# Altium footprint library footprints.PcbLib: 65 footprints (part 2 of 5)
Each footprint in its own frame and in the unit in brackets; x right, y up, seen from the top. Pads: shape width x height; smd on the part's side, far side on the other; paste and mask are expansions set on the pad; w line width, h text height; cw(c..) or ccw(c..) is an arc to the next point about the centre after c.
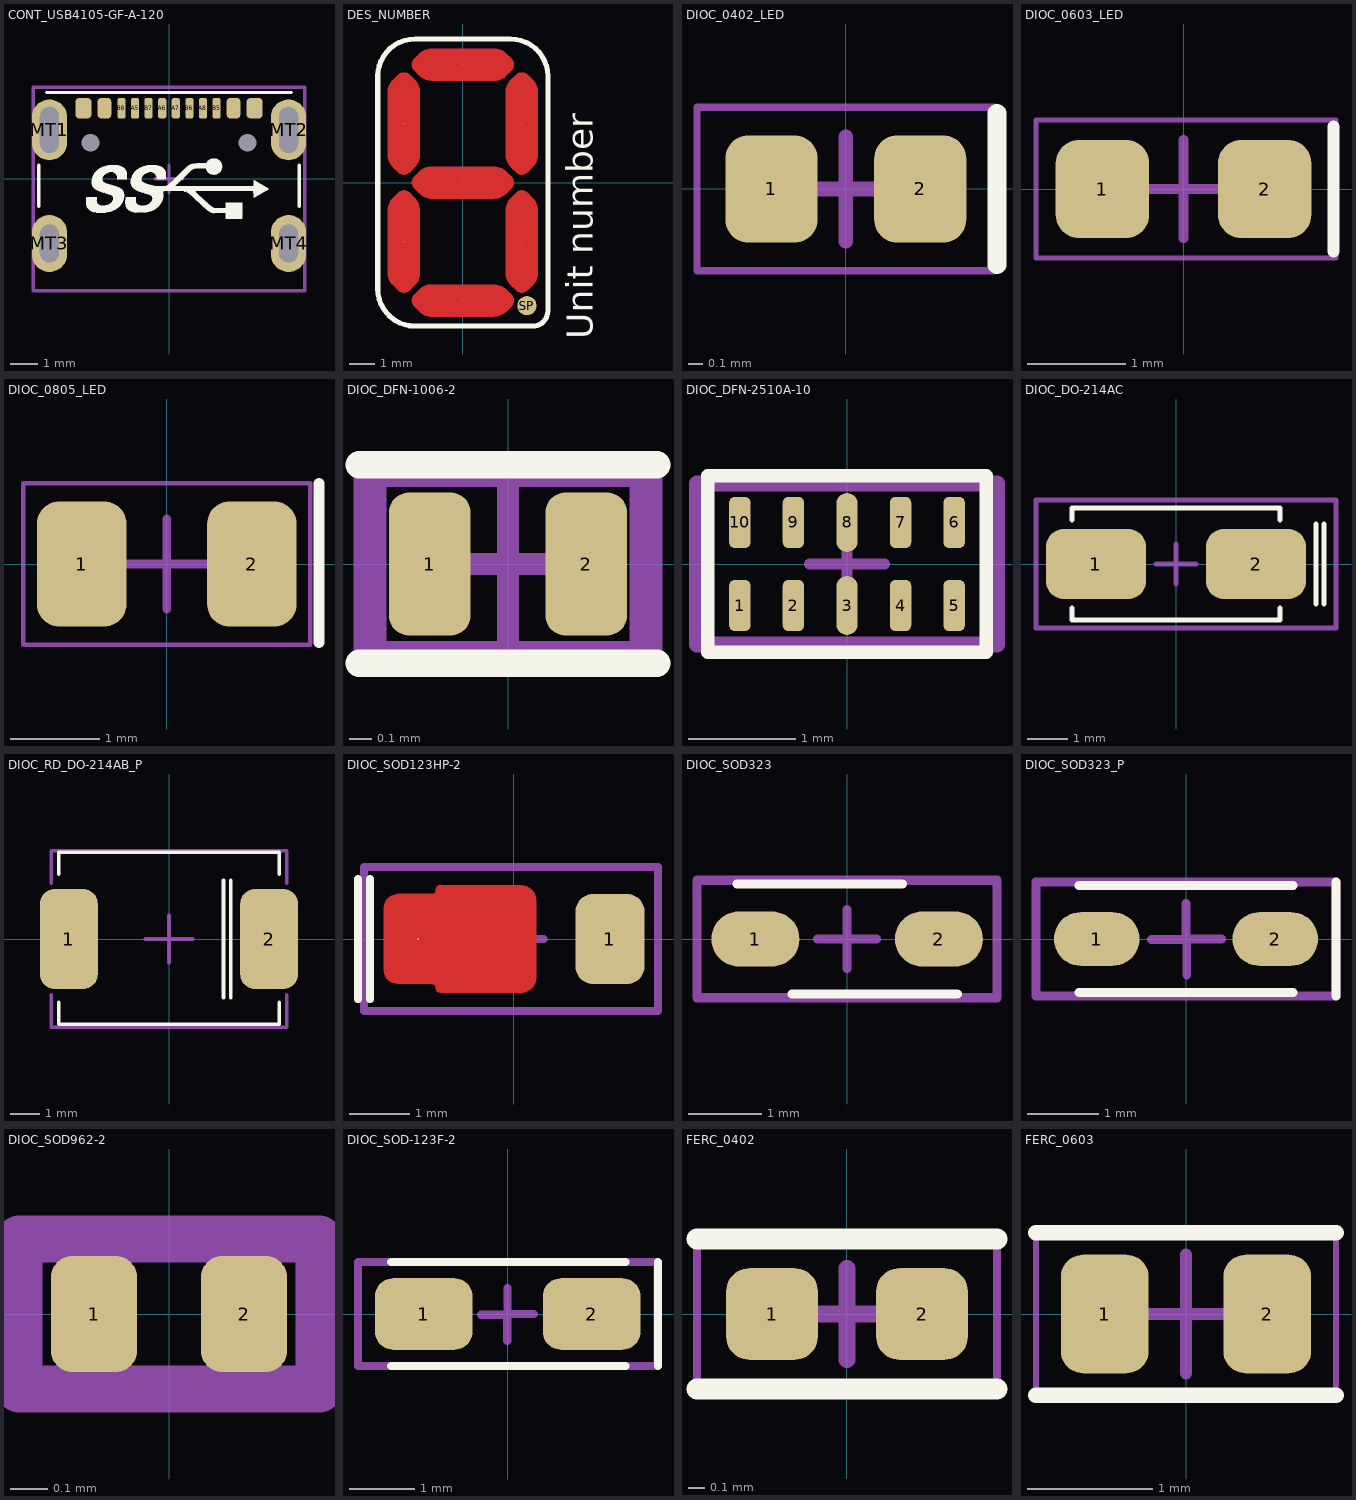
[diagram p1: the footprints below, top view; thin cyan lines are the x and y axes]

## CONT_USB4105-GF-A-120 [mm]
pads (18):
  rrect50% 0.6x0.75 smd mask+0.075: A1/B12(-3.15,2.6) B1/A12(3.15,2.6)
  rrect50% 0.5x0.75 smd mask+0.075: A4/B9(-2.375,2.6) B4/A9(2.375,2.6)
  rrect50% 0.3x0.75 smd mask+0.075: A5(-1.25,2.6) A6(-0.25,2.6) A7(0.25,2.6) A8(1.25,2.6) B5(1.75,2.6) B6(0.75,2.6) B7(-0.75,2.6) B8(-1.75,2.6)
  rrect50% 0.3x0.3 hole 0.65 unplated: MH(-2.89,1.325) MH(2.89,1.325)
  oval 1.3x2.24 / inner oval 1.3x2.24 / far side oval 1.5x2.5 hole 0.7 slot 1.7 at 90 deg: MT1(-4.4,1.803) MT2(4.4,1.803)
  oval 1.3x2.1 / inner oval 1.3x2.1 / far side oval 1.5x2.35 hole 0.7 slot 1.4 at 90 deg: MT3(-4.4,-2.377) MT4(4.4,-2.377)
Top Overlay:
  drawing of 5 lines, arcs and shapes, not listed
Mechanical 15:
  lines w0.125: -0.5,0 0,0 ; 0,-0.5 0,0 ; 0,0.5 0,0 ; 0.5,0 0,0 ; -5,-4.122 5,-4.122 5,3.378 -5,3.378 -5,-4.122
3D body "USB4105-GF-A-120.stp": height 3.26, standoff -1.2, extent -4.47,-4.922 4.47,2.778

## DES_NUMBER [mm]
pads (8):
  round 0.75 smd paste-2539.97 mask+0.05: SP(2.5,-4.8)
  round 0.025 smd paste-2539.97 mask+0.05: SP1(-2.3,2.3) SP2(0,4.6) SP3(2.3,2.3) SP4(2.3,-2.3) SP5(0,-4.6) SP6(-2.3,-2.3) SP7(0,0)
Top Layer:
  region: 1.888,-0.587 2.075,-0.4 2.097,-0.378 2.149,-0.343 2.207,-0.319 2.269,-0.307 2.331,-0.307 2.393,-0.319 2.451,-0.343 2.503,-0.378 2.525,-0.4 2.712,-0.587 2.737,-0.612 2.782,-0.667 2.822,-0.727 2.856,-0.79 2.883,-0.856 2.904,-0.925 2.918,-0.995 2.925,-1.066 2.925,-1.102 2.925,-3.54 2.925,-3.571 2.919,-3.632 2.907,-3.693 2.889,-3.752 2.865,-3.809 2.836,-3.863 2.802,-3.915 2.763,-3.962 2.741,-3.984 2.525,-4.2 2.503,-4.222 2.451,-4.257 2.393,-4.281 2.331,-4.293 2.269,-4.293 2.207,-4.281 2.149,-4.257 2.097,-4.222 2.075,-4.2 1.859,-3.984 1.837,-3.962 1.798,-3.915 1.764,-3.863 1.735,-3.809 1.711,-3.752 1.693,-3.693 1.681,-3.632 1.675,-3.571 1.675,-3.54 1.675,-1.102 1.675,-1.066 1.682,-0.995 1.696,-0.925 1.717,-0.856 1.744,-0.79 1.778,-0.727 1.818,-0.667 1.863,-0.612
  region: -1.888,-0.587 -2.075,-0.4 -2.097,-0.378 -2.149,-0.343 -2.207,-0.319 -2.269,-0.307 -2.331,-0.307 -2.393,-0.319 -2.451,-0.343 -2.503,-0.378 -2.525,-0.4 -2.712,-0.587 -2.737,-0.612 -2.782,-0.667 -2.822,-0.727 -2.856,-0.79 -2.883,-0.856 -2.904,-0.925 -2.918,-0.995 -2.925,-1.066 -2.925,-1.102 -2.925,-3.54 -2.925,-3.571 -2.919,-3.632 -2.907,-3.693 -2.889,-3.752 -2.865,-3.809 -2.836,-3.863 -2.802,-3.915 -2.763,-3.962 -2.741,-3.984 -2.525,-4.2 -2.503,-4.222 -2.451,-4.257 -2.393,-4.281 -2.331,-4.293 -2.269,-4.293 -2.207,-4.281 -2.149,-4.257 -2.097,-4.222 -2.075,-4.2 -1.859,-3.984 -1.837,-3.962 -1.798,-3.915 -1.764,-3.863 -1.735,-3.809 -1.711,-3.752 -1.693,-3.693 -1.681,-3.632 -1.675,-3.571 -1.675,-3.54 -1.675,-1.102 -1.675,-1.066 -1.682,-0.995 -1.696,-0.925 -1.717,-0.856 -1.744,-0.79 -1.778,-0.727 -1.818,-0.667 -1.863,-0.612
  region: 1.713,-0.412 1.9,-0.225 1.922,-0.203 1.957,-0.151 1.981,-0.093 1.993,-0.031 1.993,0.031 1.981,0.093 1.957,0.151 1.922,0.203 1.9,0.225 1.713,0.412 1.688,0.437 1.633,0.482 1.573,0.522 1.51,0.556 1.444,0.583 1.375,0.604 1.305,0.618 1.234,0.625 1.198,0.625 -1.24,0.625 -1.271,0.625 -1.332,0.619 -1.393,0.607 -1.452,0.589 -1.509,0.565 -1.563,0.536 -1.615,0.502 -1.662,0.463 -1.684,0.441 -1.9,0.225 -1.922,0.203 -1.957,0.151 -1.981,0.093 -1.993,0.031 -1.993,-0.031 -1.981,-0.093 -1.957,-0.151 -1.922,-0.203 -1.9,-0.225 -1.684,-0.441 -1.662,-0.463 -1.615,-0.502 -1.563,-0.536 -1.509,-0.565 -1.452,-0.589 -1.393,-0.607 -1.332,-0.619 -1.271,-0.625 -1.24,-0.625 1.198,-0.625 1.234,-0.625 1.305,-0.618 1.375,-0.604 1.444,-0.583 1.51,-0.556 1.573,-0.522 1.633,-0.482 1.688,-0.437
  region: -1.888,0.587 -2.075,0.4 -2.097,0.378 -2.149,0.343 -2.207,0.319 -2.269,0.307 -2.331,0.307 -2.393,0.319 -2.451,0.343 -2.503,0.378 -2.525,0.4 -2.712,0.587 -2.737,0.612 -2.782,0.667 -2.822,0.727 -2.856,0.79 -2.883,0.856 -2.904,0.925 -2.918,0.995 -2.925,1.066 -2.925,1.102 -2.925,3.54 -2.925,3.571 -2.919,3.632 -2.907,3.693 -2.889,3.752 -2.865,3.809 -2.836,3.863 -2.802,3.915 -2.763,3.962 -2.741,3.984 -2.525,4.2 -2.503,4.222 -2.451,4.257 -2.393,4.281 -2.331,4.293 -2.269,4.293 -2.207,4.281 -2.149,4.257 -2.097,4.222 -2.075,4.2 -1.859,3.984 -1.837,3.962 -1.798,3.915 -1.764,3.863 -1.735,3.809 -1.711,3.752 -1.693,3.693 -1.681,3.632 -1.675,3.571 -1.675,3.54 -1.675,1.102 -1.675,1.066 -1.682,0.995 -1.696,0.925 -1.717,0.856 -1.744,0.79 -1.778,0.727 -1.818,0.667 -1.863,0.612
  region: 1.888,0.587 2.075,0.4 2.097,0.378 2.149,0.343 2.207,0.319 2.269,0.307 2.331,0.307 2.393,0.319 2.451,0.343 2.503,0.378 2.525,0.4 2.712,0.587 2.737,0.612 2.782,0.667 2.822,0.727 2.856,0.79 2.883,0.856 2.904,0.925 2.918,0.995 2.925,1.066 2.925,1.102 2.925,3.54 2.925,3.571 2.919,3.632 2.907,3.693 2.889,3.752 2.865,3.809 2.836,3.863 2.802,3.915 2.763,3.962 2.741,3.984 2.525,4.2 2.503,4.222 2.451,4.257 2.393,4.281 2.331,4.293 2.269,4.293 2.207,4.281 2.149,4.257 2.097,4.222 2.075,4.2 1.859,3.984 1.837,3.962 1.798,3.915 1.764,3.863 1.735,3.809 1.711,3.752 1.693,3.693 1.681,3.632 1.675,3.571 1.675,3.54 1.675,1.102 1.675,1.066 1.682,0.995 1.696,0.925 1.717,0.856 1.744,0.79 1.778,0.727 1.818,0.667 1.863,0.612
  region: -1.713,5.012 -1.9,4.825 -1.922,4.803 -1.957,4.751 -1.981,4.693 -1.993,4.631 -1.993,4.569 -1.981,4.507 -1.957,4.449 -1.922,4.397 -1.9,4.375 -1.713,4.188 -1.688,4.163 -1.633,4.118 -1.573,4.078 -1.51,4.044 -1.444,4.017 -1.375,3.996 -1.305,3.982 -1.234,3.975 -1.198,3.975 1.24,3.975 1.271,3.975 1.332,3.981 1.393,3.993 1.452,4.011 1.509,4.035 1.563,4.064 1.615,4.098 1.662,4.137 1.684,4.159 1.9,4.375 1.922,4.397 1.957,4.449 1.981,4.507 1.993,4.569 1.993,4.631 1.981,4.693 1.957,4.751 1.922,4.803 1.9,4.825 1.684,5.041 1.662,5.063 1.615,5.102 1.563,5.136 1.509,5.165 1.452,5.189 1.393,5.207 1.332,5.219 1.271,5.225 1.24,5.225 -1.198,5.225 -1.234,5.225 -1.305,5.218 -1.375,5.204 -1.444,5.183 -1.51,5.156 -1.573,5.122 -1.633,5.082 -1.688,5.037
  region: 1.713,-5.012 1.9,-4.825 1.922,-4.803 1.957,-4.751 1.981,-4.693 1.993,-4.631 1.993,-4.569 1.981,-4.507 1.957,-4.449 1.922,-4.397 1.9,-4.375 1.713,-4.188 1.688,-4.163 1.633,-4.118 1.573,-4.078 1.51,-4.044 1.444,-4.017 1.375,-3.996 1.305,-3.982 1.234,-3.975 1.198,-3.975 -1.24,-3.975 -1.271,-3.975 -1.332,-3.981 -1.393,-3.993 -1.452,-4.011 -1.509,-4.035 -1.563,-4.064 -1.615,-4.098 -1.662,-4.137 -1.684,-4.159 -1.9,-4.375 -1.922,-4.397 -1.957,-4.449 -1.981,-4.507 -1.993,-4.569 -1.993,-4.631 -1.981,-4.693 -1.957,-4.751 -1.922,-4.803 -1.9,-4.825 -1.684,-5.041 -1.662,-5.063 -1.615,-5.102 -1.563,-5.136 -1.509,-5.165 -1.452,-5.189 -1.393,-5.207 -1.332,-5.219 -1.271,-5.225 -1.24,-5.225 1.198,-5.225 1.234,-5.225 1.305,-5.218 1.375,-5.204 1.444,-5.183 1.51,-5.156 1.573,-5.122 1.633,-5.082 1.688,-5.037
Top Overlay:
  lines w0.2: -1.865,5.6 ccw(c-1.865,4.149) -3.316,4.149 -3.316,-4.149 ccw(c-1.865,-4.149) -1.865,-5.6 2.726,-5.6 ccw(c2.726,-5.01) 3.316,-5.01 3.316,4.149 ccw(c1.865,4.149) 1.865,5.6 -1.83,5.6
  text "Unit number" at 5.424,-6.1 h1.75
Top Solder:
  lines w0.265: -2.54,-0.46 ccw(c-3,0) -2.54,0.46 ; 2.54,-0.46 cw(c3,0) 2.54,0.46
  lines w0.5: -1.8,-3.1 ccw(c-0.8,-3.1) -0.8,-4.1 0.8,-4.1 ccw(c0.8,-3.1) 1.8,-3.1 1.8,-1.5 ccw(c0.8,-1.5) 0.8,-0.5 -0.8,-0.5 ccw(c-0.8,-1.5) -1.8,-1.5 -1.8,-3.1 ; -1.8,1.5 ccw(c-0.8,1.5) -0.8,0.5 0.8,0.5 ccw(c0.8,1.5) 1.8,1.5 1.8,3.1 ccw(c0.8,3.1) 0.8,4.1 -0.8,4.1 ccw(c-0.8,3.1) -1.8,3.1 -1.8,1.5
  lines w0.95: -2.45,-3.65 -1.15,-4.75 ; -2.45,3.65 -1.15,4.75 ; 0.65,-4.9 2.5,-4.9 ; 1.15,-4.75 2.45,-3.65 ; 1.15,4.75 2.45,3.65 ; 2.6,-4.9 2.6,-1 1.6,0 2.6,1 2.6,3.8 1.3,4.9 0,4.9 -1.3,4.9 -2.6,3.8 -2.6,1 -1.6,0 -2.6,-1 -2.6,-3.8 -1.3,-4.9 0,-4.9 1.3,-4.9 2.6,-3.8

## DIOC_0402_LED [mm] "Chip Capacitor, 2-Leads, Body 1,00x0,50mm, IPC Medium Density"
height 0.7
pads (2):
  rrect50% 0.62x0.72 smd: 1(-0.5,0) 2(0.5,0)
Top Overlay:
  lines w0.125: 1.016,-0.508 1.016,0.508
Mechanical 15:
  lines w0.05: -1,-0.55 -1,0.55 1,0.55 1,-0.55 -1,-0.55
  lines w0.1: -0.35,0 0.35,0 ; 0,-0.35 0,0.35
3D body "LB_QH9G-N1OO-35-1.stp": height 0.35, standoff 0, extent -0.494,-0.252 0.51,0.252

## DIOC_0603_LED [mm] "Chip Capacitor, 2-Leads, Body 1,60x0,80mm, IPC Medium Density"
height 1
pads (2):
  rrect50% 0.95x1 smd: 1(-0.825,0) 2(0.825,0)
Top Overlay:
  lines w0.125: 1.524,-0.635 1.524,0.635
Mechanical 15:
  lines w0.05: -1.5,-0.7 1.55,-0.7 1.55,0.7 -1.5,0.7 -1.5,-0.7
  lines w0.1: -0.5,0 0.5,0 ; 0,-0.5 0,0.5
3D body "KO_EELP41.22-Q1S2-25-A8J8-020-R18.stp": height 0.38, standoff -0.02, extent -0.8,-0.4 0.8,0.4

## DIOC_0805_LED [mm] "Chip Capacitor, 2-Leads, Body 2,00x1,25mm, IPC Medium Density"
height 1.5
pads (2):
  rrect50% 1x1.4 smd: 1(-0.95,0) 2(0.95,0)
Top Overlay:
  lines w0.125: 1.7,-0.878 1.7,0.9
Mechanical 15:
  lines w0.05: -1.6,-0.9 1.6,-0.9 1.6,0.9 -1.6,0.9 -1.6,-0.9
  lines w0.1: -0.5,0 0.5,0 ; 0,-0.5 0,0.5
3D body "LO_R976-PS-1.stp": height 0.9, standoff 0, extent -1.05,-0.675 1.05,0.675

## DIOC_DFN-1006-2 [mm]
pads (2):
  rrect50% 0.37x0.65 smd paste-2539.97 mask+0.05: 1(-0.355,0) 2(0.355,0)
Top Overlay:
  lines w0.125: 0,-0.45 0.675,-0.45 0,-0.45 ; 0,-0.45 -0.675,-0.45 0,-0.45 ; 0,0.45 -0.675,0.45 0,0.45 ; 0,0.45 0.675,0.45 0,0.45
Top Paste:
  circle w0.4: c-0.45,0 r0.07
  circle w0.4: c0.45,0 r0.07
Mechanical 15:
  lines w0.1: -0.35,0 0.35,0 ; 0,-0.35 0,0.35
  lines w0.15: -0.625,-0.425 0.625,-0.425 0.625,0.425 -0.625,0.425 -0.625,-0.425
3D body "SOD882.step": height 0.48, standoff 0.01, extent -0.497,-0.303 0.503,0.297

## DIOC_DFN-2510A-10 [mm]
pads (10):
  rrect50% 0.2x0.475 smd: 1(-1,-0.387) 2(-0.5,-0.387) 4(0.5,-0.387) 5(1,-0.387) 6(1,0.387) 7(0.5,0.387) 9(-0.5,0.387) 10(-1,0.387)
  oval 0.2x0.55 smd: 3(0,-0.387) 8(0,0.387)
Top Overlay:
  lines w0.125: -1.3,-0.825 -1.3,0.825 1.3,0.825 1.3,-0.825 -1.3,-0.825
Mechanical 15:
  lines w0.1: -0.35,0 0.35,0 ; 0,-0.35 0,0.35
  lines w0.15: -1.4,-0.75 1.4,-0.75 1.4,0.75 0,0.75 -1.4,0.75 -1.4,-0.75
3D body "SOT1176-2.step": height 0.47, standoff -0.01, extent -1.25,-0.5 1.25,0.5

## DIOC_DO-214AC [mm]
pads (2):
  rrect50% 2.5x1.75 smd: 1(-2,0) 2(2,0)
Top Overlay:
  lines w0.125: -2.6,-1.1 -2.6,-1.4 2.6,-1.4 2.6,-1.1 ; -2.6,1.1 -2.6,1.4 2.6,1.4 2.6,1.1 ; 3.5,-1 3.5,1 ; 3.7,-1 3.7,1
Mechanical 15:
  lines w0.125: -0.5,0 0,0 ; 0,-0.5 0,0 ; 0,0.5 0,0 ; 0.5,0 0,0 ; -3.5,-1.6 -3.5,0 -3.5,1.6 4,1.6 4,0 4,-1.6 -3.5,-1.6
3D body "SS14.stp": height 2.7, standoff 0, extent -2.6,-1.362 2.6,1.362

## DIOC_RD_DO-214AB_P [mm]
pads (2):
  rrect50% 1.96x3.39 smd: 1(-3.4,0) 2(3.4,0)
Top Overlay:
  lines w0.125: -3.75,-2.15 -3.75,-2.9 3.75,-2.9 3.75,-2.15 ; -3.75,2.2 -3.75,2.95 3.75,2.95 3.75,2.2 ; 1.85,-2 1.85,2 ; 2.1,-2 2.1,2
Mechanical 15:
  lines w0.125: -4,-1.9 -4,-3 4,-3 4,-1.9 ; -4,1.9 -4,3 4,3 4,1.9 ; -0.8,0 0,0 ; 0,-0.8 0,0 ; 0,0.8 0,0 ; 0.8,0 0,0
3D body "SS32.stp": height 2.65, standoff 0, extent -3.975,-2.95 3.975,2.95

## DIOC_SOD123HP-2 [mm]
pads (2):
  rrect50% 1.15x1.5 smd paste-2539.97: 1(1.6,0)
  round 0.025 smd paste-2539.97: 2(-1.6,0)
Top Layer:
  region: 0.1,0.9 -1.225,0.9 -1.24,0.9 -1.267,0.889 -1.289,0.867 -1.3,0.84 -1.3,0.825 -1.301,0.81 -1.313,0.783 -1.333,0.763 -1.36,0.751 -1.375,0.75 -1.925,0.75 -1.95,0.75 -1.998,0.74 -2.043,0.722 -2.084,0.694 -2.119,0.659 -2.147,0.618 -2.165,0.573 -2.175,0.525 -2.175,0.5 -2.175,-0.5 -2.175,-0.525 -2.165,-0.573 -2.147,-0.618 -2.119,-0.659 -2.084,-0.694 -2.043,-0.722 -1.998,-0.74 -1.95,-0.75 -1.925,-0.75 -1.375,-0.75 -1.36,-0.751 -1.333,-0.763 -1.313,-0.783 -1.301,-0.81 -1.3,-0.825 -1.3,-0.84 -1.289,-0.867 -1.268,-0.889 -1.24,-0.9 -1.225,-0.9 0.1,-0.9 0.127,-0.9 0.18,-0.889 0.23,-0.869 0.275,-0.839 0.314,-0.8 0.344,-0.755 0.364,-0.705 0.375,-0.652 0.375,-0.625 0.375,0.625 0.375,0.652 0.364,0.705 0.344,0.755 0.314,0.8 0.275,0.839 0.23,0.869 0.18,0.889 0.127,0.9
Top Overlay:
  lines w0.125: -2.6,-1 -2.6,1 ; -2.4,-1 -2.4,1
Top Paste:
  region: -1.9,0.7 -1.3,0.7 -1.26,0.7 -1.187,0.67 -1.13,0.613 -1.1,0.54 -1.1,0.5 -1.1,-0.5 -1.1,-0.54 -1.13,-0.613 -1.187,-0.67 -1.26,-0.7 -1.3,-0.7 -1.9,-0.7 -1.94,-0.7 -2.013,-0.67 -2.07,-0.613 -2.1,-0.54 -2.1,-0.5 -2.1,0.5 -2.1,0.54 -2.07,0.613 -2.013,0.67 -1.94,0.7
  region: 1.3,0.7 1.9,0.7 1.94,0.7 2.013,0.67 2.07,0.613 2.1,0.54 2.1,0.5 2.1,-0.5 2.1,-0.54 2.07,-0.613 2.013,-0.67 1.94,-0.7 1.9,-0.7 1.3,-0.7 1.26,-0.7 1.187,-0.67 1.13,-0.613 1.1,-0.54 1.1,-0.5 1.1,0.5 1.1,0.54 1.13,0.613 1.187,0.67 1.26,0.7
  region: -0.7,0.8 0.1,0.8 0.14,0.8 0.213,0.77 0.27,0.713 0.3,0.64 0.3,0.6 0.3,-0.6 0.3,-0.64 0.27,-0.713 0.213,-0.77 0.14,-0.8 0.1,-0.8 -0.7,-0.8 -0.74,-0.8 -0.813,-0.77 -0.87,-0.713 -0.9,-0.64 -0.9,-0.6 -0.9,0.6 -0.9,0.64 -0.87,0.713 -0.813,0.77 -0.74,0.8
Mechanical 15:
  lines w0.125: -0.5,0 0,0 ; 0,-0.5 0,0 ; 0,0.5 0,0 ; 0.5,0 0,0 ; -2.5,-1.2 2.4,-1.2 2.4,1.2 -2.5,1.2 -2.5,-1.2
3D body "PMEG3030EXEX.stp": height 0.9, standoff 0, extent -1.85,-0.886 1.85,0.886

## DIOC_SOD323 [mm]
pads (2):
  oval 1.2x0.75 smd: 1(-1.25,0) 2(1.25,0)
Top Overlay:
  lines w0.125: -1.5,0.75 0.75,0.75 ; -0.75,-0.75 1.5,-0.75
Mechanical 15:
  lines w0.125: -0.4,0 0,0 ; 0,-0.4 0,0 ; 0,0.4 0,0 ; 0.4,0 0,0 ; -2.045,-0.8 -2.045,0.8 2.042,0.8 2.042,-0.8 -2.045,-0.8
3D body "SOD323.step": height 1.08, standoff -0.03, extent -1.291,-0.65 1.227,0.65

## DIOC_SOD323_P [mm]
pads (2):
  oval 1.2x0.75 smd: 1(-1.25,0) 2(1.25,0)
Top Overlay:
  lines w0.125: -1.5,-0.75 1.5,-0.75 ; -1.5,0.75 1.5,0.75 ; 2.1,-0.8 2.1,0.8
Mechanical 15:
  lines w0.125: -0.486,-0.005 0.014,-0.005 ; 0,0.5 0,0 0.5,0 ; 0.011,-0.501 0.011,-0.001 ; -2.1,-0.8 -2.1,0.8 2.1,0.8 2.1,-0.8 -2.1,-0.8
3D body "1N4148WS-G3-08.stp": height 1.15, standoff 0, extent -1.338,-0.65 1.338,0.65

## DIOC_SOD962-2 [mm]
pads (2):
  rrect50% 0.23x0.31 smd paste-2539.97 mask-2539.97: 1(-0.2,0) 2(0.2,0)
Top Paste:
  circle w0.128: c0.2,0 r0.064
  circle w0.128: c-0.2,0 r0.064
Top Solder:
  region: 0.05,-0.115 0.05,0.115 0.05,0.13 0.061,0.157 0.083,0.179 0.11,0.19 0.125,0.19 0.275,0.19 0.29,0.19 0.317,0.179 0.339,0.157 0.35,0.13 0.35,0.115 0.35,-0.115 0.35,-0.13 0.339,-0.157 0.317,-0.179 0.29,-0.19 0.275,-0.19 0.125,-0.19 0.11,-0.19 0.083,-0.179 0.061,-0.157 0.05,-0.13
  region: -0.35,-0.115 -0.35,0.115 -0.35,0.13 -0.339,0.157 -0.317,0.179 -0.29,0.19 -0.275,0.19 -0.125,0.19 -0.11,0.19 -0.083,0.179 -0.061,0.157 -0.05,0.13 -0.05,0.115 -0.05,-0.115 -0.05,-0.13 -0.061,-0.157 -0.083,-0.179 -0.11,-0.19 -0.125,-0.19 -0.275,-0.19 -0.29,-0.19 -0.317,-0.179 -0.339,-0.157 -0.35,-0.13
Mechanical 15:
  lines w0.125: -0.4,-0.2 0.4,-0.2 0.4,0.2 -0.4,0.2 -0.4,-0.2
3D body "SOD962-2.step": height 0.3, standoff -0.02, extent -0.3,-0.148 0.3,0.152

## DIOC_SOD-123F-2 [mm]
pads (2):
  rrect50% 1.5x1.1 smd: 1(-1.29,0) 2(1.29,0)
Top Overlay:
  lines w0.125: -1.79,-0.8 1.81,-0.8 ; -1.79,0.8 1.81,0.8 ; 2.31,-0.8 2.31,0.8
Mechanical 15:
  lines w0.125: -0.407,-0.012 -0.007,-0.012 -0.007,-0.412 ; 0,0.4 0,0 0.4,0 ; -2.3,-0.8 -2.3,0.8 2.3,0.8 2.3,-0.8 -2.3,-0.8
3D body "BZT52H-C3V3,115.stp": height 1.1, standoff 0, extent -1.74,-0.8 1.76,0.8

## FERC_0402 [mm] "Chip Resistor, 2-Leads, Body 1,00x0,50mm, IPC Medium Density"
height 0.37
pads (2):
  rrect50% 0.55x0.55 smd: 1(-0.45,0) 2(0.45,0)
Top Overlay:
  lines w0.125: -0.9,-0.45 0.9,-0.45 ; -0.9,0.45 0.9,0.45
Mechanical 15:
  lines w0.05: -0.9,-0.45 0.9,-0.45 0.9,0.45 -0.9,0.45 -0.9,-0.45
  lines w0.1: -0.275,0 0.275,0 ; 0,-0.275 0,0.275
3D body "RESC1005X04N.step": height 0.37, standoff 0, extent -0.525,-0.275 0.525,0.275

## FERC_0603 [mm] "Chip Resistor, 2-Leads, Body 1,55x0,85mm, IPC Medium Density"
height 0.55
pads (2):
  rrect50% 0.7x0.95 smd: 1(-0.65,0) 2(0.65,0)
Top Overlay:
  lines w0.125: -1.2,-0.65 1.2,-0.65 ; -1.2,0.65 1.2,0.65
Mechanical 15:
  lines w0.05: -1.2,-0.65 1.2,-0.65 1.2,0.65 -1.2,0.65 -1.2,-0.65
  lines w0.1: -0.475,0 0.475,0 ; 0,-0.475 0,0.475
3D body "RESC1608X06N.step": height 0.55, standoff 0, extent -0.8,-0.475 0.8,0.475